# EAGLE library part IC_74HCT4066PW (library dp_devices.v6)
Quad single-pole single-throw analog switch
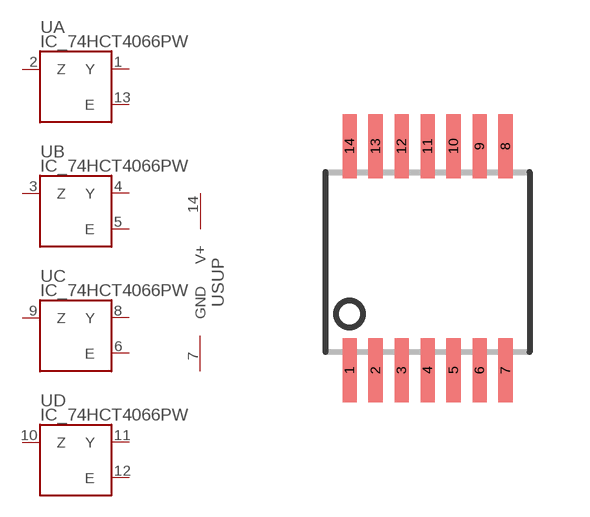
[diagram p207: symbol with the pads of TSSOP-14; footprint TSSOP-14]

Designator prefix U; gates A=4066 B=4066 C=4066 D=4066 SUP=SUPPLY

## IC_74HCT4066PW  [TSSOP-14]
1  A:Y
2  A:Z
3  B:Z
4  B:Y
5  B:E  in
6  C:E  in
7  SUP:GND  sup
8  C:Y
9  C:Z
10  D:Z
11  D:Y
12  D:E  in
13  A:E  in
14  SUP:V+  sup

## Footprint TSSOP-14 (pad centres in mm)
smd 0.35 x 1.6: 1 -1.95,-2.7; 2 -1.3,-2.7; 3 -0.65,-2.7; 4 0,-2.7; 5 0.65,-2.7; 6 1.3,-2.7; 7 1.95,-2.7; 8 1.95,2.9; 9 1.3,2.9; 10 0.65,2.9; 11 0,2.9; 12 -0.65,2.9; 13 -1.3,2.9; 14 -1.95,2.9